# Altium footprint library SamacSys.PcbLib: 1008 footprints (part 3 of 63)
Each footprint in its own frame and in the unit in brackets; x right, y up, seen from the top. Pads: shape width x height; smd on the part's side, far side on the other; paste and mask are expansions set on the pad; w line width, h text height; cw(c..) or ccw(c..) is an arc to the next point about the centre after c.
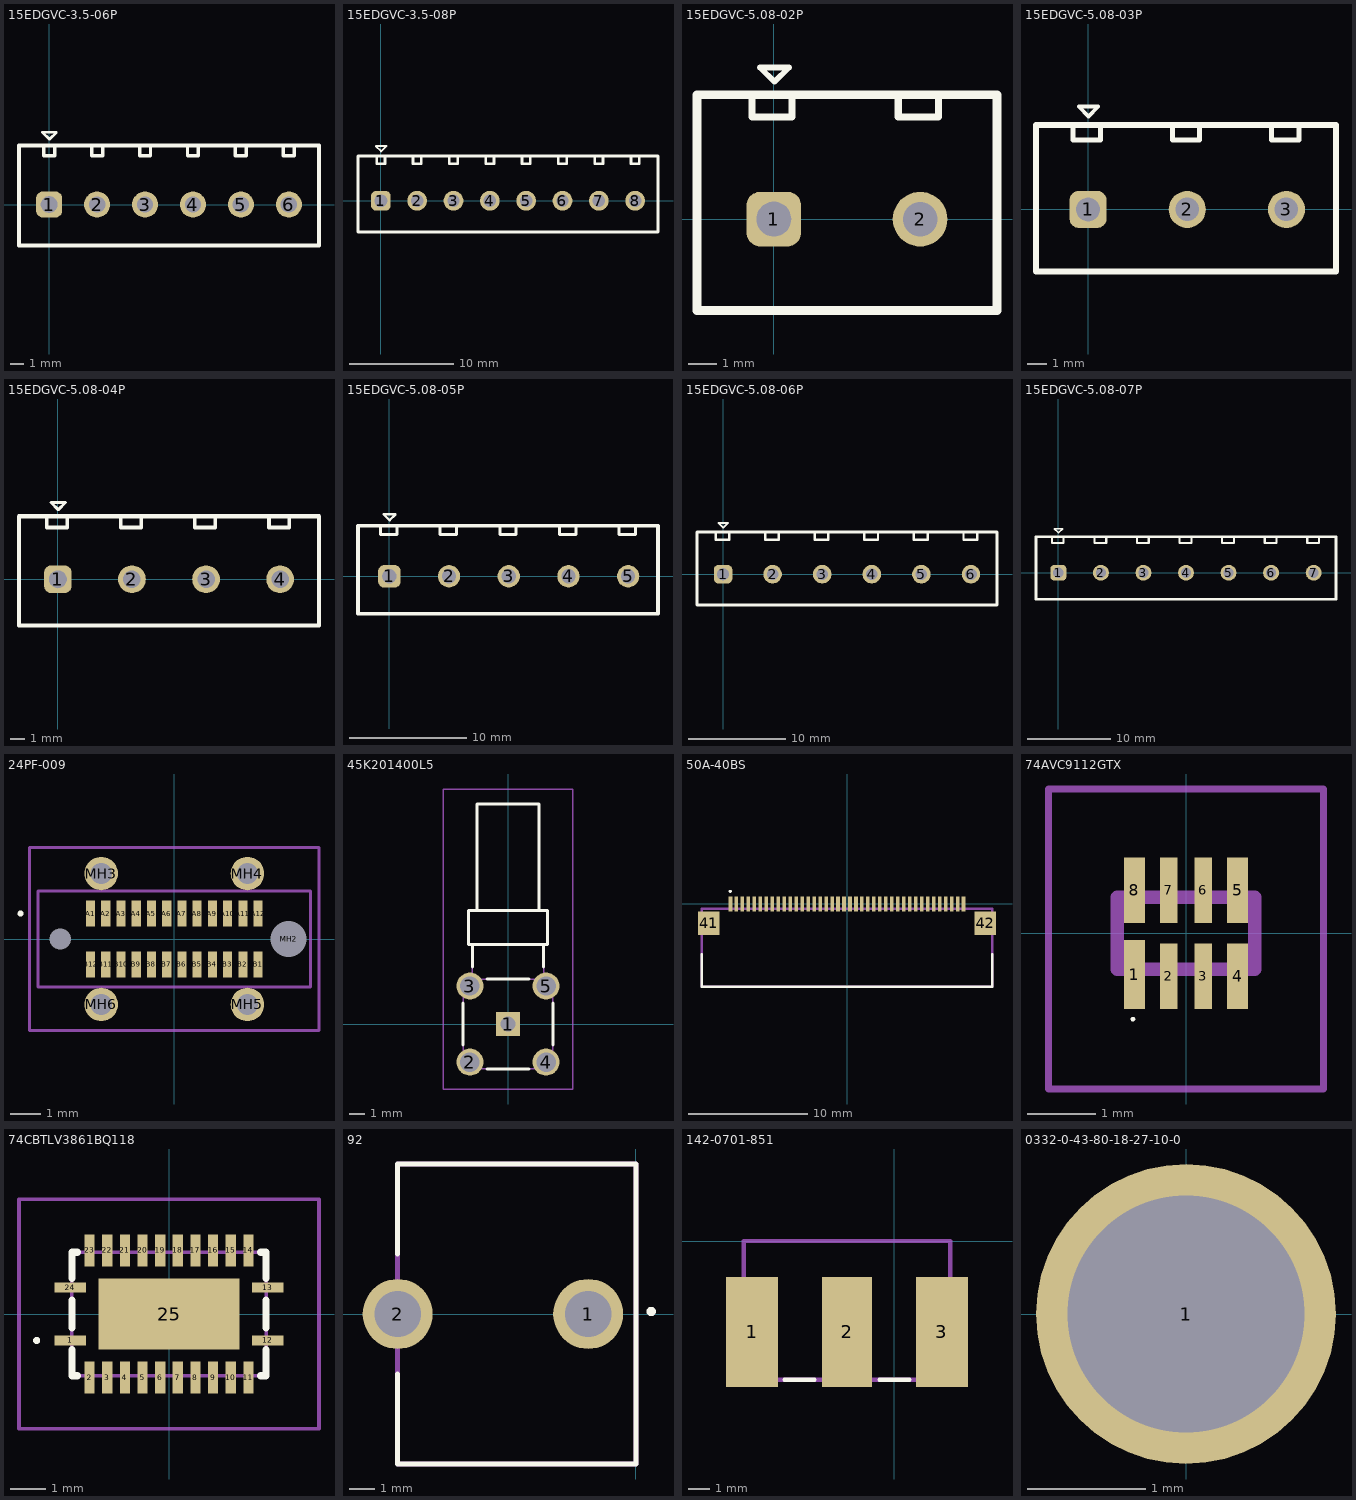
[diagram p2: the footprints below, top view; thin cyan lines are the x and y axes]

## 15EDGVC-3.5-06P [mm]
pads (6):
  rrect50% 1.9x1.9 hole 1.2: 1(0,0)
  round 1.9 hole 1.2: 2(3.5,0) 3(7,0) 4(10.5,0) 5(14,0) 6(17.5,0)
Top Overlay:
  lines w0.2: -0.476,5.267 0.524,5.267 0.024,4.767 -0.476,5.267
  lines w0.25: -0.4,4.3 -0.4,3.55 0.4,3.55 0.4,4.2 ; 3.1,4.3 3.1,3.55 3.9,3.55 3.9,4.2 ; 6.6,4.3 6.6,3.55 7.4,3.55 7.4,4.2 ; 10.1,4.3 10.1,3.55 10.9,3.55 10.9,4.2 ; 13.6,4.3 13.6,3.55 14.4,3.55 14.4,4.2 ; 17.1,4.3 17.1,3.55 17.9,3.55 17.9,4.2
  lines w0.3: -2.2,-3 19.7,-3 19.7,4.3 -2.2,4.3 -2.2,-3
3D body "15EDGVC-3.5-06P-14-00A(H).stp": height 9.2, standoff -3.4, extent -2.1,-3 19.7,4.24

## 15EDGVC-3.5-08P [mm]
pads (8):
  rrect50% 1.9x1.9 hole 1.2: 1(0,0)
  round 1.9 hole 1.2: 2(3.5,0) 3(7,0) 4(10.5,0) 5(14,0) 6(17.5,0) 7(21,0) 8(24.5,0)
Top Overlay:
  lines w0.2: -0.476,5.267 0.524,5.267 0.024,4.767 -0.476,5.267
  lines w0.25: -0.4,4.3 -0.4,3.55 0.4,3.55 0.4,4.2 ; 3.1,4.3 3.1,3.55 3.9,3.55 3.9,4.2 ; 6.6,4.3 6.6,3.55 7.4,3.55 7.4,4.2 ; 10.1,4.3 10.1,3.55 10.9,3.55 10.9,4.2 ; 13.6,4.3 13.6,3.55 14.4,3.55 14.4,4.2 ; 17.1,4.3 17.1,3.55 17.9,3.55 17.9,4.2 ; 20.6,4.3 20.6,3.55 21.4,3.55 21.4,4.2 ; 24.1,4.3 24.1,3.55 24.9,3.55 24.9,4.2
  lines w0.3: -2.2,-3 26.7,-3 26.7,4.3 -2.2,4.3 -2.2,-3
3D body "15EDGVC-3.5-08P-14-00A(H).stp": height 9.2, standoff -3.4, extent -2.1,-3 26.7,4.24

## 15EDGVC-5.08-02P [mm]
pads (2):
  rrect50% 1.9x1.9 hole 1.2: 1(0,0)
  round 1.9 hole 1.2: 2(5.08,0)
Top Overlay:
  lines w0.2: -0.476,5.267 0.024,4.767 0.524,5.267 -0.476,5.267
  lines w0.25: -0.762,4.3 -0.762,3.55 0.635,3.55 0.635,4.2 ; 4.318,4.3 4.318,3.55 5.715,3.55 5.715,4.2
  lines w0.3: -2.667,-3.175 -2.667,4.318 7.75,4.318 7.75,-3.175 -2.667,-3.175
3D body "15EDGVC-5.08-02P-14-00A(H).stp": height 9.2, standoff -3.4, extent -2.58,-2.99 7.58,4.25
3D body "15EDGK-5.08-02P-1Y-00A&Z(H) (1).stp": height 22.4, standoff 6.9, extent -2.54,-6.782 7.62,4.318

## 15EDGVC-5.08-03P [mm] "15EDGVC-5.08-03P + 15EDGK-5.08-03P"
pads (3):
  rrect50% 1.9x1.9 hole 1.2: 1(0,0)
  round 1.9 hole 1.2: 2(5.08,0) 3(10.16,0)
Top Overlay:
  lines w0.2: -0.476,5.267 0.024,4.767 0.524,5.267 -0.476,5.267
  lines w0.25: -0.762,4.3 -0.762,3.55 0.635,3.55 0.635,4.2 ; 4.318,4.3 4.318,3.55 5.715,3.55 5.715,4.2 ; 9.398,4.3 9.398,3.55 10.795,3.55 10.795,4.2
  lines w0.3: -2.667,-3.175 -2.667,4.318 12.7,4.318 12.7,-3.175 -2.667,-3.175
3D body "15EDGVC-5.08-03P-1Y-00A&Z(H).stp": height 9.2, standoff -3.4, extent -2.54,-3.048 12.7,4.192
3D body "15EDGK-5.08-03P-1Y-00A&Z(H) (1).stp": height 18.4, standoff 2.9, extent -2.54,-6.35 12.7,4.75

## 15EDGVC-5.08-04P [mm] "15EDGVC-5.08-04P + 15EDGK-5.08-04P"
pads (4):
  rrect50% 1.9x1.9 hole 1.2: 1(0,0)
  round 1.9 hole 1.2: 2(5.08,0) 3(10.16,0) 4(15.24,0)
Top Overlay:
  lines w0.2: -0.476,5.267 0.024,4.767 0.524,5.267 -0.476,5.267
  lines w0.25: -0.762,4.3 -0.762,3.55 0.635,3.55 0.635,4.2 ; 4.318,4.3 4.318,3.55 5.715,3.55 5.715,4.2 ; 9.398,4.3 9.398,3.55 10.795,3.55 10.795,4.2 ; 14.478,4.3 14.478,3.55 15.875,3.55 15.875,4.2
  lines w0.3: -2.667,-3.175 -2.667,4.318 17.907,4.318 17.907,-3.175 -2.667,-3.175
3D body "15EDGVC-5.08-04P-14-00A(H).stp": height 9.2, standoff -3.4, extent -2.54,-2.985 17.78,4.255
3D body "15EDGK-5.08-04P-1Y-00A&Z(H).stp": height 19.4, standoff 3.9, extent -2.54,-6.35 17.78,4.75

## 15EDGVC-5.08-05P [mm] "15EDGVC-5.08-05P + 15EDGK-5.08-05P"
pads (5):
  rrect50% 1.9x1.9 hole 1.2: 1(0,0)
  round 1.9 hole 1.2: 2(5.08,0) 3(10.16,0) 4(15.24,0) 5(20.32,0)
Top Overlay:
  lines w0.2: -0.476,5.267 0.024,4.767 0.524,5.267 -0.476,5.267
  lines w0.25: -0.762,4.3 -0.762,3.55 0.635,3.55 0.635,4.2 ; 4.318,4.3 4.318,3.55 5.715,3.55 5.715,4.2 ; 9.398,4.3 9.398,3.55 10.795,3.55 10.795,4.2 ; 14.478,4.3 14.478,3.55 15.875,3.55 15.875,4.2 ; 19.558,4.3 19.558,3.55 20.955,3.55 20.955,4.2
  lines w0.3: -2.667,-3.175 22.86,-3.175 22.86,4.318 -2.667,4.318 -2.667,-3.175
3D body "15EDGK-5.08-05P-1Y-00A&Z(H).stp": height 20.4, standoff 4.9, extent -2.54,-6.35 22.86,4.75
3D body "15EDGVC-5.08-05P-1Y-00A&Z(H).stp": height 9.2, standoff -3.4, extent -2.54,-2.985 22.86,4.255

## 15EDGVC-5.08-06P [mm] "15EDGVC-5.08-06P + 15EDGK-5.08-06P"
pads (6):
  rrect50% 1.9x1.9 hole 1.2: 1(0,0)
  round 1.9 hole 1.2: 2(5.08,0) 3(10.16,0) 4(15.24,0) 5(20.32,0) 6(25.4,0)
Top Overlay:
  lines w0.2: -0.476,5.267 0.024,4.767 0.524,5.267 -0.476,5.267
  lines w0.25: -0.762,4.3 -0.762,3.55 0.635,3.55 0.635,4.2 ; 4.318,4.3 4.318,3.55 5.715,3.55 5.715,4.2 ; 9.398,4.3 9.398,3.55 10.795,3.55 10.795,4.2 ; 14.478,4.3 14.478,3.55 15.875,3.55 15.875,4.2 ; 19.558,4.3 19.558,3.55 20.955,3.55 20.955,4.2 ; 24.638,4.3 24.638,3.55 26.035,3.55 26.035,4.2
  lines w0.3: -2.667,-3.175 -2.667,4.318 28.067,4.318 28.067,-3.175 -2.667,-3.175
3D body "15EDGVC-5.08-06P-14-00A(H).stp": height 9.2, standoff -3.4, extent -2.54,-2.985 27.94,4.255
3D body "15EDGK-5.08-06P-1Y-00A&Z(H).stp": height 18.4, standoff 2.9, extent -2.54,-6.02 27.94,5.08

## 15EDGVC-5.08-07P [mm] "15EDGVC-5.08-07P + 15EDGK-5.08-07P"
pads (7):
  rrect50% 1.9x1.9 hole 1.2: 1(0,0)
  round 1.9 hole 1.2: 2(5.08,0) 3(10.16,0) 4(15.24,0) 5(20.32,0) 6(25.4,0) 7(30.48,0)
Top Overlay:
  lines w0.2: -0.476,5.267 0.524,5.267 0.024,4.767 -0.476,5.267
  lines w0.25: -0.762,4.3 -0.762,3.55 0.635,3.55 0.635,4.2 ; 4.318,4.3 4.318,3.55 5.715,3.55 5.715,4.2 ; 9.398,4.3 9.398,3.55 10.795,3.55 10.795,4.2 ; 14.478,4.3 14.478,3.55 15.875,3.55 15.875,4.2 ; 19.558,4.3 19.558,3.55 20.955,3.55 20.955,4.2 ; 24.638,4.3 24.638,3.55 26.035,3.55 26.035,4.2 ; 29.718,4.3 29.718,3.55 31.115,3.55 31.115,4.2
  lines w0.3: -2.667,-3.175 33.147,-3.175 33.147,4.318 -2.667,4.318 -2.667,-3.175
3D body "15EDGK-5.08-06P-1Y-00A&Z(H).stp": height 18.4, standoff 2.9, extent -2.54,-6.02 27.94,5.08
3D body "15EDGVC-5.08-06P-14-00A(H).stp": height 9.2, standoff -3.4, extent -2.54,-2.985 27.94,4.255

## 24PF-009 [mm] "24PF-010"
pads (30):
  rect 0.3x0.85 smd: A1(-2.75,0.835) A2(-2.25,0.835) A3(-1.75,0.835) A4(-1.25,0.835) A5(-0.75,0.835) A6(-0.25,0.835) A7(0.25,0.835) A8(0.75,0.835) A9(1.25,0.835) A10(1.75,0.835) A11(2.25,0.835) A12(2.75,0.835) B1(2.75,-0.835) B2(2.25,-0.835) B3(1.75,-0.835) B4(1.25,-0.835) B5(0.75,-0.835) B6(0.25,-0.835) B7(-0.25,-0.835) B8(-0.75,-0.835) B9(-1.25,-0.835) B10(-1.75,-0.835) B11(-2.25,-0.835) B12(-2.75,-0.835)
  round 0.3 hole 0.7 unplated: MH1(-3.75,0)
  round 0.585 hole 1.17 unplated: MH2(3.75,0)
  round 1.1 hole 0.7: MH3(-2.4,2.15) MH4(2.4,2.15) MH5(2.4,-2.15) MH6(-2.4,-2.15)
Top Overlay:
  lines w0.1: -5.1,0.835 cw(c-5.05,0.835) -5,0.835 cw(c-5.05,0.835) -5.1,0.835
Assembly:
  lines w0.1: -4.47,-1.58 4.47,-1.58 4.47,1.58 -4.47,1.58 -4.47,-1.58
Countryard:
  lines w0.1: -4.75,-3 4.75,-3 4.75,3 -4.75,3 -4.75,-3
3D body "219320-0001.stp": height 8.79, standoff -1.11, extent -4.47,-2.3 4.47,2.3

## 45K201400L5 [mm]
pads (5):
  rect 1.6x1.6 hole 1: 1(0,0)
  round 1.8 hole 1.3: 2(-2.54,-2.54) 3(-2.54,2.54) 4(2.54,-2.54) 5(2.54,2.54)
Top Overlay:
  lines w0.2: -3,-1.4 -3,1.4 ; -2.38,3.8 -2.38,5.3 ; -2.075,7.6 -2.075,14.7 2.075,14.7 2.075,7.6 ; -1.4,-3 1.4,-3 ; -1.4,3 1.4,3 ; 2.38,3.8 2.38,5.3 ; 3,-1.4 3,1.4 ; -2.38,5.3 -2.625,5.3 -2.625,7.6 2.625,7.6 2.625,5.3 2.38,5.3 ; -2.38,5.3 2.38,5.3
Assembly:
  lines w0.1: -2.38,3 -2.38,5.3 ; -2.075,7.6 -2.075,14.7 2.075,14.7 2.075,7.6 ; 2.38,3 2.38,5.3 ; -2.38,5.3 2.38,5.3 ; -2.38,5.3 -2.625,5.3 -2.625,7.6 2.625,7.6 2.625,5.3 2.38,5.3 ; -3,-3 3,-3 3,3 -3,3 -3,-3
Countryard:
  lines w0.1: -4.34,-4.34 4.34,-4.34 4.34,15.7 -4.34,15.7 -4.34,-4.34
3D body "282100-75.stp": height 7.25, standoff -2.95, extent -3.5,-3.5 3.5,15.8

## 50A-40BS [mm]
pads (42):
  rect 0.3x1.25 smd: 1(-9.75,0) 2(-9.25,0) 3(-8.75,0) 4(-8.25,0) 5(-7.75,0) 6(-7.25,0) 7(-6.75,0) 8(-6.25,0) 9(-5.75,0) 10(-5.25,0) 11(-4.75,0) 12(-4.25,0) 13(-3.75,0) 14(-3.25,0) 15(-2.75,0) 16(-2.25,0) 17(-1.75,0) 18(-1.25,0) 19(-0.75,0) 20(-0.25,0) 21(0.25,0) 22(0.75,0) 23(1.25,0) 24(1.75,0) 25(2.25,0) 26(2.75,0) 27(3.25,0) 28(3.75,0) 29(4.25,0) 30(4.75,0) 31(5.25,0) 32(5.75,0) 33(6.25,0) 34(6.75,0) 35(7.25,0) 36(7.75,0) 37(8.25,0) 38(8.75,0) 39(9.25,0) 40(9.75,0)
  rect 1.8x2 smd: 41(-11.55,-1.625) 42(11.55,-1.625)
Top Overlay:
  circle w0.2: c-9.768,1.037 r0.027
  lines w0.2: -12.15,-4.214 -12.15,-6.95 12.15,-6.95 12.15,-4.214
Assembly:
  lines w0.2: -12.15,-6.95 12.15,-6.95 12.15,-0.4 -12.15,-0.4 -12.15,-6.95
3D body "54104-4031.stp": height 2.05, standoff 0, extent -12.75,-5.21 12.75,0.39

## 74AVC9112GTX [mm]
pads (8):
  rect 0.3x1 smd: 1(-0.75,-0.6)
  rect 0.25x0.95 smd: 2(-0.25,-0.625) 3(0.25,-0.625) 6(0.25,0.625) 7(-0.25,0.625)
  rect 0.3x0.95 smd: 4(0.75,-0.625) 5(0.75,0.625) 8(-0.75,0.625)
Top Overlay:
  lines w0.034: -0.789,-1.249 cw(c-0.772,-1.249) -0.755,-1.249 cw(c-0.772,-1.249) -0.789,-1.249
Assembly:
  lines w0.2: -1,-0.525 -1,0.525 1,0.525 1,-0.525 -1,-0.525
Countryard:
  lines w0.1: -2,-2.266 -2,2.1 2,2.1 2,-2.266 -2,-2.266
3D body "74LVC2G08GT,115.stp": height 0.48, standoff 0, extent -0.975,-0.586 0.975,0.414

## 74CBTLV3861BQ118 [mm]
pads (25):
  rect 0.9x0.29 smd: 1(-2.8,-0.75) 12(2.8,-0.75) 13(2.8,0.75) 24(-2.8,0.75)
  rect 0.29x0.9 smd: 2(-2.25,-1.8) 3(-1.75,-1.8) 4(-1.25,-1.8) 5(-0.75,-1.8) 6(-0.25,-1.8) 7(0.25,-1.8) 8(0.75,-1.8) 9(1.25,-1.8) 10(1.75,-1.8) 11(2.25,-1.8) 14(2.25,1.8) 15(1.75,1.8) 16(1.25,1.8) 17(0.75,1.8) 18(0.25,1.8) 19(-0.25,1.8) 20(-0.75,1.8) 21(-1.25,1.8) 22(-1.75,1.8) 23(-2.25,1.8)
  rect 4x2 smd: 25(0,0)
Top Overlay:
  lines w0.1: -3.8,-0.75 ccw(c-3.75,-0.75) -3.7,-0.75 ccw(c-3.75,-0.75) -3.8,-0.75
  lines w0.2: -2.75,-1 -2.75,-1.75 -2.6,-1.75 ; -2.75,-0.4 -2.75,0.4 ; -2.75,1 -2.75,1.75 -2.6,1.75 ; 2.6,-1.75 2.75,-1.75 2.75,-1 ; 2.6,1.75 2.75,1.75 2.75,1 ; 2.75,-0.4 2.75,0.4
Assembly:
  lines w0.1: -2.75,-1.75 2.75,-1.75 2.75,1.75 -2.75,1.75 -2.75,-1.75
Countryard:
  lines w0.1: -4.25,-3.25 4.25,-3.25 4.25,3.25 -4.25,3.25 -4.25,-3.25
3D body "74CBTLV3861BQ,118.stp": height 0.85, standoff 0, extent -2.748,-1.752 2.752,1.748

## 92 [mm]
pads (2):
  round 2.8 hole 1.85: 1(-1.91,0) 2(-9.53,0)
Top Overlay:
  circle w0.2: c0.606,0.103 r0.087
  lines w0.2: -9.53,-2.395 -9.53,-6 0,-6 0,6 -9.53,6 -9.53,2.395
Assembly:
  lines w0.2: -9.53,-6 -9.53,6 0,6 0,-6 -9.53,-6
3D body "92.stp": height 15.13, standoff -3.81, extent -9.512,-6.725 0.021,6.725

## 142-0701-851 [mm]
pads (3):
  rect 2.413x5.08 smd: 1(-6.572,-4.19) 3(2.191,-4.19)
  rect 2.286x5.08 smd: 2(-2.191,-4.19)
Top Overlay:
  lines w0.2: -5.073,-6.4 -3.69,-6.4 ; -0.692,-6.4 0.692,-6.4
Assembly:
  lines w0.2: -6.951,-6.4 2.569,-6.4 2.569,0 -6.951,0 -6.951,-6.4
3D body "142-0701-801.stp": height 4.59, standoff -3.33, extent -7.013,-16.525 2.512,-2.25

## 0332-0-43-80-18-27-10-0 [mm] "Mill-Max Open-Bottom Contacts, for pin .037\"-.043\" (0,940- / 1,092mm)"
pads (1):
  round 2.54 hole 2.007 mask+0.05: 1(0,0)
Countryard:
  lines w0.1: -1,0 1,0 ; 0,-1 0,1
3D body "0332-0-43-80-18-27-10-0.stp": height 0.4, standoff -2.27, extent -1.135,-1.143 1.135,1.143